# Altium schematic symbol library POGO_LIQUID_TEST_V1.0.SchLib: 8 symbols
Pins are listed as number, name and electrical type; pins without a type are passive.

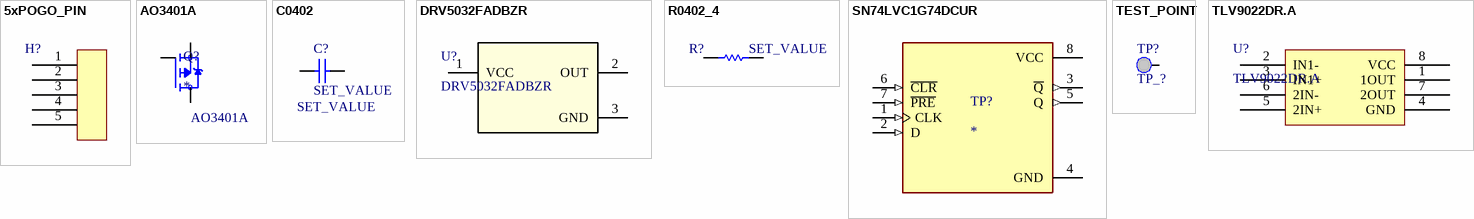
[diagram p0: symbols 5xPOGO_PIN to TLV9022DR.A]

## 5xPOGO_PIN
designator H?  (value not drawn)
footprint PAD POGOPIN
pins: 1, 2, 3, 4, 5

## AO3401A
designator Q?  MP: AO3401A
P-MOS SOT-23 Vds_-30V IdMax_-4A@TA25C AO3401A; MF: Alpha & Omega Semiconductor; SnapEDA_Link: https://www.snapeda.com/parts/AO3401A/Alpha/view-part/?ref=snap; Package: SOT-23; Value: *; Check_prices: https://www.snapeda.com/parts/AO3401A/Alpha/view-part/?ref=eda; JLCPCB Part #: C15127; LCSC Part #: C15127; Manufacturer: Alpha & Omega Semiconductor; Manufacturer Part Number: AO3401A
footprint SOT23-3
pins: 1 G, 2 S, 3 D

## C0402
designator C?, comment SET_VALUE
CAP 0402 MLCC NON-POLARIZED GENERIC; VALUE TOLERANCE VOLTAGE AND MPN SET ON INSTANCE; Type: Capacitor; Value2: SET_VOLTAGE; Case: 0402; Package: 0402; Value1: SET_VALUE
footprint C0402L
pins: 1, 2

## DRV5032FADBZR
designator U?
Low-power (5Hz, <1ÂµA) low-voltage (up to 5.5V) switch 3-SOT-23 -40 to 85; Manufacturer_Name: Texas Instruments; TYPE: TYPE; RefDes: RefDes; Copyright: Copyright (C) 2026 Ultra Librarian. All rights reserved.; Manufacturer_Part_Number: DRV5032FADBZR
footprint DBZ0003A-MFG
pins: 1 VCC (power), 2 OUT (oc), 3 GND (power)

## R0402_4
designator R?, comment SET_VALUE
RES 0402 GENERIC; VALUE TOLERANCE POWER AND MPN SET ON INSTANCE; Value1: SET_VALUE; Case: 0402; Type: Resistor; Package: 0402
footprint R0402L1
pins: 1, 2

## SN74LVC1G74DCUR
designator TP?
Single Positive-Edge-Triggered D-Type Flip-Flop With Clear and Preset; MF: Texas Instruments; MP: SN74LVC1G74DCUR; SnapEDA_Link: https://www.snapeda.com/parts/SN74LVC1G74DCUR/Texas+Instruments/view-part/?ref=snap; Package: VSSOP-8 Texas Instruments; Value: *; Check_prices: https://www.snapeda.com/parts/SN74LVC1G74DCUR/Texas+Instruments/view-part/?ref=eda
footprint SOP50P310X90-8N
pins: 1 CLK (in), 2 D (in), 3 ~{Q} (out), 4 GND (power), 5 Q (out), 6 ~{CLR} (in), 7 ~{PRE} (in), 8 VCC (power)

## TEST_POINT
designator TP?, comment TP_?
TP SMD 1P PadDia_1.50mm ROUND COPPER TEST POINT
footprint TP_SMD_1P50 (Single 1.50 mm round top-layer copper test point for probing)
pins: 1 TP

## TLV9022DR.A
designator U?
Dual precision comparator with open-drain output 8-SOIC -40 to 125
footprint D0008A-MFG
pins: 1 1OUT, 2 IN1-, 3 IN1+, 4 GND, 5 2IN+, 6 2IN-, 7 2OUT, 8 VCC